# Altium footprint library FTP.PcbLib: 207 footprints (part 6 of 13)
Each footprint in its own frame and in the unit in brackets; x right, y up, seen from the top. Pads: shape width x height; smd on the part's side, far side on the other; paste and mask are expansions set on the pad; w line width, h text height; cw(c..) or ccw(c..) is an arc to the next point about the centre after c.
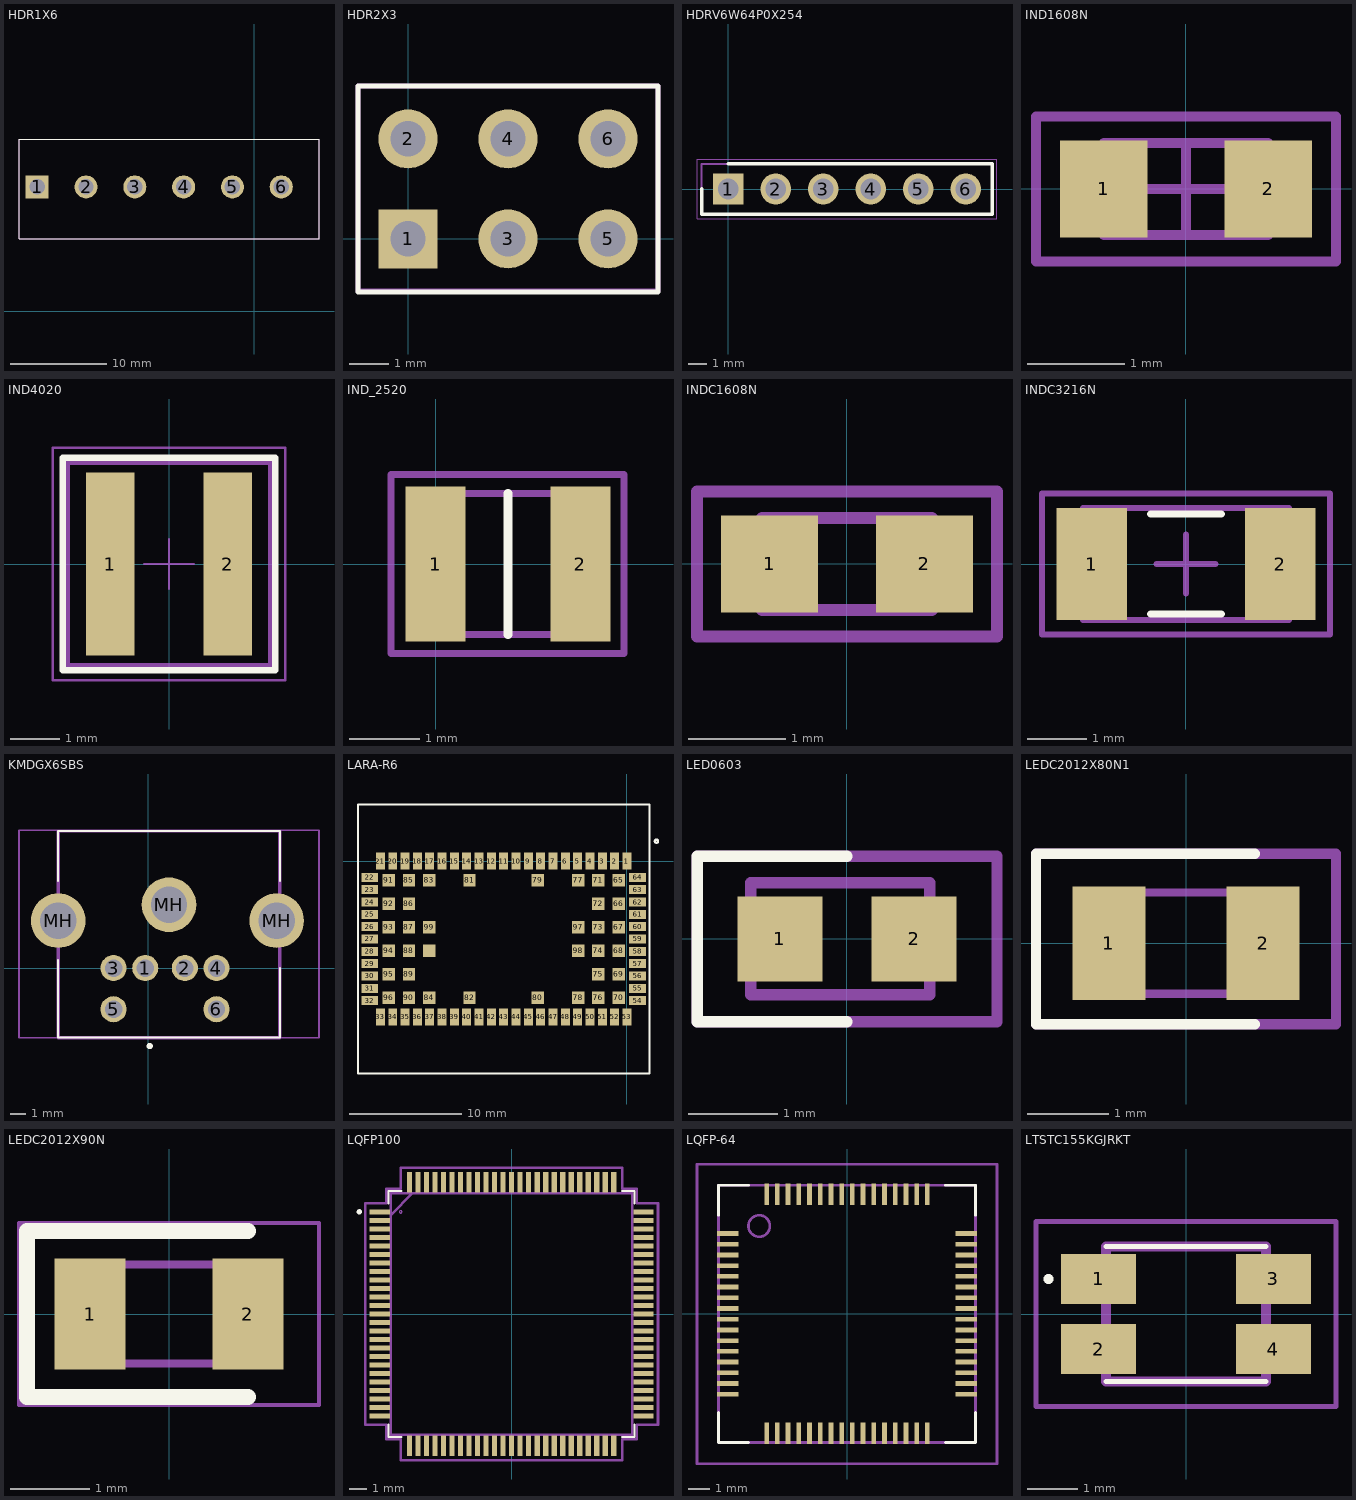
[diagram p5: the footprints below, top view; thin cyan lines are the x and y axes]

## HDR1X6 [mm]
pads (6):
  rect 2.4x2.4 hole 1.6: 1(-22.606,12.954)
  round 2.4 hole 1.6: 2(-17.526,12.954) 3(-12.446,12.954) 4(-7.366,12.954) 5(-2.286,12.954) 6(2.794,12.954)
Top Overlay:
  lines w0.127: -24.5,7.55 -24.5,17.925 6.725,17.925 6.725,7.55 -24.5,7.55
Mechanical 13:
  lines w0.127: -24.5,7.55 -24.5,17.925 6.725,17.925 6.725,7.55 -24.5,7.55
Mechanical 15:
  lines w0.127: -24.5,7.55 6.725,7.55 6.725,17.925 -24.5,17.925 -24.5,7.55
3D body "CUI_DEVICES_TB007-508-06BE.step": height 14, standoff -3.7, extent -24.43,7.62 6.65,17.87

## HDR2X3 [mm] "Connector; Header; 3x2 Position"
pads (6):
  rect 1.5x1.5 hole 0.9: 1(0,0)
  round 1.5 hole 0.9: 2(0,2.54) 3(2.54,0) 4(2.54,2.54) 5(5.08,0) 6(5.08,2.54)
Top Overlay:
  lines w0.127: -1.27,-1.35 -1.27,3.885 6.35,3.885 6.35,-1.35 -1.27,-1.35
Mechanical 15:
  lines w0.127: -1.27,-1.32 6.35,-1.32 6.35,3.885 -1.27,3.885 -1.27,-1.32
3D body "Download_STP_61300621121 (rev1).stp": height 8.67, standoff -2.87, extent -1.27,-1.27 6.35,3.81

## HDRV6W64P0X254 [mm]
pads (6):
  rect 1.65x1.65 / inner round 1.65 / far side rect 1.65x1.65 hole 1.1: 1(0,0)
  round 1.65 hole 1.1: 2(2.54,0) 3(5.08,0) 4(7.62,0) 5(10.16,0) 6(12.7,0)
Top Overlay:
  lines w0.2: -1.42,0 -1.42,-1.345 14.12,-1.345 14.12,1.345 0,1.345
Mechanical 15:
  lines w0.1: -1.42,-1.345 14.12,-1.345 14.12,1.345 -1.42,1.345 -1.42,-1.345
Mechanical 20:
  lines w0.05: -1.67,-1.595 14.37,-1.595 14.37,1.595 -1.67,1.595 -1.67,-1.595
3D body "61300611121.stp": height 8.69, standoff -3.2, extent -1.27,-1.345 13.97,1.195

## IND1608N [mm] "Chip Resistor, Body 1.6x0.8mm, IPC Medium Density"
height 0.6
pads (2):
  rect 0.9x1 smd: 1(-0.85,0) 2(0.85,0)
Mechanical 13:
  lines w0.1: -0.85,-0.475 0.85,-0.475 0.85,0.475 -0.85,0.475 -0.85,-0.475
Mechanical 15:
  lines w0.1: -0.475,0 0.475,0 ; 0,-0.475 0,0.475 ; -1.55,-0.75 1.55,-0.75 1.55,0.75 -1.55,0.75 -1.55,-0.75
3D body "0603S1.STEP": height 0.43, standoff -0.02, extent -0.988,-0.45 0.988,0.529

## IND4020 [mm] "SMT Shielded Power Inductor, body 4.1x4.1mm"
height 2.1
pads (2):
  rect 0.98x3.7 smd: 1(-1.185,0) 2(1.185,0)
Top Overlay:
  lines w0.127: -2.15,-2.15 2.15,-2.15 2.15,2.15 -2.15,2.15 -2.15,-2.15
Mechanical 13:
  lines w0.1: -2.05,-2.05 -2.05,2.05 2.05,2.05 2.05,-2.05 -2.05,-2.05
Mechanical 15:
  lines w0.05: -0.5,0 0.5,0 ; 0,-0.5 0,0.5 ; -2.35,-2.35 -2.35,2.35 2.35,2.35 2.35,-2.35 -2.35,-2.35
3D body "WE-IndMAPI_SSMC-4020.stp": height 2.1, standoff 0, extent -2.05,-2.05 2.05,2.05

## IND_2520 [mm]
pads (2):
  rect 0.85x2.2 smd: 1(0,0) 2(2.05,0)
Top Overlay:
  lines w0.127: 1.025,-1 1.025,1
Mechanical 15:
  lines w0.1: -0.635,-1.27 2.667,-1.27 2.667,1.27 -0.635,1.27 -0.635,-1.27 ; -0.225,-1 2.275,-1 2.275,1 -0.225,1 -0.225,-1
3D body "1239AS-H-100M=P2.stp": height 1.2, standoff 0, extent -0.225,-1 2.275,1

## INDC1608N [mm] "Chip Inductor, Body 1.6x0.8mm, IPC Medium Density"
height 0.71
pads (2):
  rect 1x1 smd: 1(-0.8,0) 2(0.8,0)
Mechanical 13:
  lines w0.127: -0.875,-0.475 0.875,-0.475 0.875,0.475 -0.875,0.475 -0.875,-0.475
Mechanical 15:
  lines w0.127: -1.55,-0.75 1.55,-0.75 1.55,0.75 -1.55,0.75 -1.55,-0.75
  text "+" at -0.503,-0.758 h1.5
3D body: height 0.71, standoff 0, extent -0.875,-0.475 0.875,0.475

## INDC3216N [mm] "Chip Inductor, Body 3.2x1.6mm, IPC Medium Density"
height 1.9
pads (2):
  rect 1.2x1.9 smd: 1(-1.6,0) 2(1.6,0)
Top Overlay:
  lines w0.127: -0.6,-0.85 0.6,-0.85 ; -0.6,0.85 0.6,0.85
Mechanical 13:
  lines w0.1: -1.75,-0.95 1.75,-0.95 1.75,0.95 -1.75,0.95 -1.75,-0.95
Mechanical 15:
  lines w0.1: -0.5,0 0.5,0 ; 0,-0.5 0,0.5 ; -2.45,-1.2 2.45,-1.2 2.45,1.2 -2.45,1.2 -2.45,-1.2
3D body "CAPC1206.STEP": height 1.3, standoff -0.01, extent -1.974,-0.976 1.975,0.976

## KMDGX6SBS [mm]
pads (9):
  round 1.65 hole 1.1: 1(-0.2,0) 2(2.3,0) 3(-2.2,0) 4(4.3,0) 5(-2.2,-2.6) 6(4.3,-2.6)
  round 3.45 hole 2.3: MH(-5.7,3) MH(1.3,4) MH(8.1,3)
Top Overlay:
  circle w0.2: c0.085,-4.926 r0.1
  lines w0.127: -5.7,0.5 -5.7,-4.4 8.3,-4.4 8.3,0 ; -5.7,5.5 -5.7,8.65 8.3,8.65 8.3,5.5
Mechanical 13:
  lines w0.2: -5.7,-4.4 -5.7,8.65 8.3,8.65 8.3,-4.4 -5.7,-4.4
Mechanical 15:
  lines w0.1: -8.175,-4.4 -8.175,8.7 10.775,8.7 10.775,-4.4 -8.175,-4.4
3D body "5749231-1.STEP": height 13, standoff -3.86, extent -5.825,-4.225 8.175,8.602

## LARA-R6 [mm] "Footprint for LARA modules"
pads (100):
  rect 0.8x1.5 smd paste-2539.97: 1(0,0) 2(-1.1,0) 3(-2.2,0) 4(-3.3,0) 5(-4.4,0) 6(-5.5,0) 7(-6.6,0) 8(-7.7,0) 9(-8.8,0) 10(-9.9,0) 11(-11,0) 12(-12.1,0) 13(-13.2,0) 14(-14.3,0) 15(-15.4,0) 16(-16.5,0) 17(-17.6,0) 18(-18.7,0) 19(-19.8,0) 20(-20.9,0) 21(-22,0) 33(-22,-13.9) 34(-20.9,-13.9) 35(-19.8,-13.9) 36(-18.7,-13.9) 37(-17.6,-13.9) 38(-16.5,-13.9) 39(-15.4,-13.9) 40(-14.3,-13.9) 41(-13.2,-13.9) 42(-12.1,-13.9) 43(-11,-13.9) 44(-9.9,-13.9) 45(-8.8,-13.9) 46(-7.7,-13.9) 47(-6.6,-13.9) 48(-5.5,-13.9) 49(-4.4,-13.9) 50(-3.3,-13.9) 51(-2.2,-13.9) 52(-1.1,-13.9) 53(0,-13.9)
  rect 1.5x0.8 smd paste-2539.97: 22(-22.95,-1.45) 23(-22.95,-2.55) 24(-22.95,-3.65) 25(-22.95,-4.75) 26(-22.95,-5.85) 27(-22.95,-6.95) 28(-22.95,-8.05) 29(-22.95,-9.15) 30(-22.95,-10.25) 31(-22.95,-11.35) 32(-22.95,-12.45) 54(0.95,-12.45) 55(0.95,-11.35) 56(0.95,-10.25) 57(0.95,-9.15) 58(0.95,-8.05) 59(0.95,-6.95) 60(0.95,-5.85) 61(0.95,-4.75) 62(0.95,-3.65) 63(0.95,-2.55) 64(0.95,-1.45)
  rect 1.1x1.1 smd paste-0.025: 65(-0.75,-1.7) 66(-0.75,-3.8) 67(-0.75,-5.9) 68(-0.75,-8) 69(-0.75,-10.1) 70(-0.75,-12.2) 71(-2.55,-1.7) 72(-2.55,-3.8) 73(-2.55,-5.9) 74(-2.55,-8) 75(-2.55,-10.1) 76(-2.55,-12.2) 77(-4.35,-1.7) 78(-4.35,-12.2) 79(-7.95,-1.7) 80(-7.95,-12.2) 81(-14.05,-1.7) 82(-14.05,-12.2) 83(-17.65,-1.7) 84(-17.65,-12.2) 85(-19.45,-1.7) 86(-19.45,-3.8) 87(-19.45,-5.9) 88(-19.45,-8) 89(-19.45,-10.1) 90(-19.45,-12.2) 91(-21.25,-1.7) 92(-21.25,-3.8) 93(-21.25,-5.9) 94(-21.25,-8) 95(-21.25,-10.1) 96(-21.25,-12.2) 97(-4.35,-5.9) 98(-4.35,-8) 99(-17.65,-5.9) 100(-17.65,-8)
Top Overlay:
  circle w0.2: c2.625,1.775 r0.141
  lines w0.2: -24,-18.95 2,-18.95 2,5.05 -24,5.05 -24,-18.95
Top Paste:
  drawing of 64 lines, arcs and shapes, not listed
3D body "Lara.STEP": height 2.63, standoff 0.03, extent -24.029,-18.948 1.971,5.052

## LED0603 [mm]
pads (2):
  rect 0.95x0.95 smd: 1(-0.75,0) 2(0.75,0)
Top Overlay:
  lines w0.127: 0,-0.927 -1.673,-0.927 -1.673,0.924 0,0.924
Mechanical 13:
  lines w0.127: -1.075,-0.625 -1.075,0.625 0.925,0.625 0.925,-0.625 -1.075,-0.625
Mechanical 15:
  lines w0.127: -1.675,-0.925 1.675,-0.925 1.675,0.925 -1.675,0.925 -1.675,-0.925
3D body "150080BS75000_Download_STP_WL-SMCW-0805_rev1.stp": height 0.7, standoff 0, extent -1.075,-0.625 0.925,0.625

## LEDC2012X80N1 [mm]
pads (2):
  rect 0.9x1.4 smd: 1(-0.95,0) 2(0.95,0)
Top Overlay:
  lines w0.127: 0.85,-1 -1.85,-1 -1.85,1.1 0.85,1.1
Mechanical 13:
  lines w0.1: -1,0.208 -0.583,0.625 ; -1,-0.625 1,-0.625 1,0.625 -1,0.625 -1,-0.625
Mechanical 15:
  lines w0.127: -1.85,-1 1.85,-1 1.85,1.1 -1.85,1.1 -1.85,-1
3D body "150080BS75000_Download_STP_WL-SMCW-0805_rev1.stp": height 0.7, standoff 0, extent -0.95,-0.6 1.05,0.65

## LEDC2012X90N [mm]
pads (2):
  rect 0.9x1.4 smd: 1(-1,0) 2(1,0)
Top Overlay:
  lines w0.2: 1,-1.05 -1.8,-1.05 -1.8,1.05 1,1.05
Mechanical 15:
  lines w0.1: -1,0.208 -0.583,0.625 ; -1,-0.625 -1,0.625 1,0.625 1,-0.625 -1,-0.625
Mechanical 20:
  lines w0.05: -1.9,-1.15 -1.9,1.15 1.9,1.15 1.9,-1.15 -1.9,-1.15
3D body "fdtghdtfgh.step": height 0.82, standoff -0.13, extent -1.155,-0.508 1.155,0.507

## LQFP100 [mil]
pads (100):
  rect 47x12 smd: 1(-305.12,236.22) 2(-305.12,216.54) 3(-305.12,196.85) 4(-305.12,177.17) 5(-305.12,157.48) 6(-305.12,137.8) 7(-305.12,118.11) 8(-305.12,98.43) 9(-305.12,78.74) 10(-305.12,59.06) 11(-305.12,39.37) 12(-305.12,19.69) 13(-305.12,0) 14(-305.12,-19.68) 15(-305.12,-39.37) 16(-305.12,-59.06) 17(-305.12,-78.74) 18(-305.12,-98.43) 19(-305.12,-118.11) 20(-305.12,-137.8) 21(-305.12,-157.48) 22(-305.12,-177.17) 23(-305.12,-196.85) 24(-305.12,-216.54) 25(-305.12,-236.22) 51(305.12,-236.22) 52(305.12,-216.54) 53(305.12,-196.85) 54(305.12,-177.17) 55(305.12,-157.48) 56(305.12,-137.8) 57(305.12,-118.11) 58(305.12,-98.43) 59(305.12,-78.74) 60(305.12,-59.06) 61(305.12,-39.37) 62(305.12,-19.68) 63(305.12,0) 64(305.12,19.68) 65(305.12,39.37) 66(305.12,59.06) 67(305.12,78.74) 68(305.12,98.43) 69(305.12,118.11) 70(305.12,137.8) 71(305.12,157.48) 72(305.12,177.17) 73(305.12,196.85) 74(305.12,216.54) 75(305.12,236.22)
  rect 12x47 smd: 26(-236.22,-305.12) 27(-216.54,-305.12) 28(-196.85,-305.12) 29(-177.17,-305.12) 30(-157.48,-305.12) 31(-137.8,-305.12) 32(-118.11,-305.12) 33(-98.43,-305.12) 34(-78.74,-305.12) 35(-59.06,-305.12) 36(-39.37,-305.12) 37(-19.68,-305.12) 38(0,-305.12) 39(19.68,-305.12) 40(39.37,-305.12) 41(59.06,-305.12) 42(78.74,-305.12) 43(98.43,-305.12) 44(118.11,-305.12) 45(137.8,-305.12) 46(157.48,-305.12) 47(177.17,-305.12) 48(196.85,-305.12) 49(216.54,-305.12) 50(236.22,-305.12) 76(236.22,305.12) 77(216.54,305.12) 78(196.85,305.12) 79(177.17,305.12) 80(157.48,305.12) 81(137.8,305.12) 82(118.11,305.12) 83(98.43,305.12) 84(78.74,305.12) 85(59.06,305.12) 86(39.37,305.12) 87(19.68,305.12) 88(0,305.12) 89(-19.68,305.12) 90(-39.37,305.12) 91(-59.06,305.12) 92(-78.74,305.12) 93(-98.43,305.12) 94(-118.11,305.12) 95(-137.8,305.12) 96(-157.48,305.12) 97(-177.17,305.12) 98(-196.85,305.12) 99(-216.54,305.12) 100(-236.22,305.12)
Top Overlay:
  circle w6: c-352.43,236.42 r3
  lines w5: -284.5,-255.32 -284.5,-284.5 -255.32,-284.5 ; -284.5,255.32 -284.5,284.5 -255.32,284.5 ; 255.32,-284.5 284.5,-284.5 284.5,-255.32 ; 255.32,284.5 284.5,284.5 284.5,255.32
Mechanical 1:
  circle w1: c-256.62,236.22 r3
  lines w1: -279.5,229.5 -229.5,279.5 ; -279.5,-279.5 279.5,-279.5 279.5,279.5 -279.5,279.5 -279.5,-279.5
Mechanical 13:
  lines w6: -279.5,229.5 -229.5,279.5 ; -279.5,-279.5 279.5,-279.5 279.5,279.5 -279.5,279.5 -279.5,-279.5
Mechanical 15:
  lines w6: -338.62,-256.22 -289.5,-256.22 -289.5,-289.5 -256.22,-289.5 -256.22,-338.62 256.22,-338.62 256.22,-289.5 289.5,-289.5 289.5,-256.22 338.62,-256.22 338.62,256.22 289.5,256.22 289.5,289.5 256.22,289.5 256.22,338.62 -256.22,338.62 -256.22,289.5 -289.5,289.5 -289.5,256.22 -338.62,256.22 -338.62,-256.22
3D body "LQFP_0.5P_100.SLDPRT": height 64.96, standoff -1.96, extent -315.13,-315.13 315.14,315.14

## LQFP-64 [mm]
height 1.6
pads (64):
  rect 1x0.22 smd: 1(-5.575,3.75) 2(-5.575,3.25) 3(-5.575,2.75) 4(-5.575,2.25) 5(-5.575,1.75) 6(-5.575,1.25) 7(-5.575,0.75) 8(-5.575,0.25) 9(-5.575,-0.25) 10(-5.575,-0.75) 11(-5.575,-1.25) 12(-5.575,-1.75) 13(-5.575,-2.25) 14(-5.575,-2.75) 15(-5.575,-3.25) 16(-5.575,-3.75) 33(5.575,-3.75) 34(5.575,-3.25) 35(5.575,-2.75) 36(5.575,-2.25) 37(5.575,-1.75) 38(5.575,-1.25) 39(5.575,-0.75) 40(5.575,-0.25) 41(5.575,0.25) 42(5.575,0.75) 43(5.575,1.25) 44(5.575,1.75) 45(5.575,2.25) 46(5.575,2.75) 47(5.575,3.25) 48(5.575,3.75)
  rect 0.22x1 smd: 17(-3.75,-5.575) 18(-3.25,-5.575) 19(-2.75,-5.575) 20(-2.25,-5.575) 21(-1.75,-5.575) 22(-1.25,-5.575) 23(-0.75,-5.575) 24(-0.25,-5.575) 25(0.25,-5.575) 26(0.75,-5.575) 27(1.25,-5.575) 28(1.75,-5.575) 29(2.25,-5.575) 30(2.75,-5.575) 31(3.25,-5.575) 32(3.75,-5.575) 49(3.75,5.575) 50(3.25,5.575) 51(2.75,5.575) 52(2.25,5.575) 53(1.75,5.575) 54(1.25,5.575) 55(0.75,5.575) 56(0.25,5.575) 57(-0.25,5.575) 58(-0.75,5.575) 59(-1.25,5.575) 60(-1.75,5.575) 61(-2.25,5.575) 62(-2.75,5.575) 63(-3.25,5.575) 64(-3.75,5.575)
Top Overlay:
  lines w0.127: -6,-5.999 -6,-4.599 ; -6,4.6 -6,6 -4.6,6 ; -5.994,-5.999 -4.594,-5.999 ; 4.6,-6 6,-6 6,-4.6 ; 4.6,6 6,6 6,4.6
  text "." at -8.233,3.735 h0.76
Mechanical 13:
  circle w0.127: c-4.1,4.1 r0.5
  lines w0.127: -6,-6 6,-6 6,6 -6,6 -6,-6
Mechanical 15:
  lines w0.127: -7,-7 -7,6.986 7,6.986 7,-7 -7,-7
  text "+" at -0.493,-0.769 h1.5
3D body: height 1.6, standoff 0.05, extent 0,0 0,0
3D body "FT2232HL.stp": height 1.6, standoff 0, extent -6,-6 6,6

## LTSTC155KGJRKT [mm]
pads (4):
  rect 1.5x1 smd: 1(-1.75,0.7) 2(-1.75,-0.7) 3(1.75,0.7) 4(1.75,-0.7)
Top Overlay:
  lines w0.1: -1.6,-1.35 1.6,-1.35 ; -1.6,1.35 1.6,1.35 ; -2.75,0.65 cw(c-2.75,0.7) -2.75,0.75 cw(c-2.75,0.7) -2.75,0.65
Mechanical 15:
  lines w0.2: -1.6,-1.35 1.6,-1.35 1.6,1.35 -1.6,1.35 -1.6,-1.35
Mechanical 20:
  lines w0.1: -3,-1.85 3,-1.85 3,1.85 -3,1.85 -3,-1.85
3D body "dsrhgsrhshsh.step": height 1.1, standoff 0, extent -1.5,-1.27 1.5,1.23